# Altium schematic symbol library LRMAP1216A-1L0FT3.SchLib: 1 symbol
Pins are listed as number, name and electrical type; pins without a type are passive.

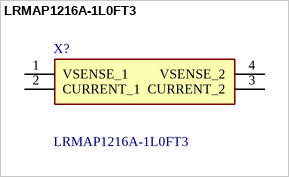
[diagram p0: symbol LRMAP1216A-1L0FT3]

## LRMAP1216A-1L0FT3
designator X?
SMD Current Sense Resistor, 0.001 ohm, LRMAP1216 Series, 1216 [3038 Metric], 3 W, +/- 1% , -65C to +170C; Manufacturer_Name: TT Electronics; Geometry.Height: 2mm; Mouser Part Number: *; Mouser Price/Stock: *; Manufacturer_Part_Number: LRMAP1216A-1L0FT3; Datasheet Link: https://www.ttelectronics.com/TTElectronics/media/ProductFiles/Datasheet/LRMAP1216.pdf
footprint LRMAP1216A1L0FT3
pins: 1 VSENSE_1, 2 CURRENT_1, 3 CURRENT_2, 4 VSENSE_2